# Altium schematic symbol library MIC5365-1P2YMT-TZ.SchLib: 1 symbol
Pins are listed as number, name and electrical type; pins without a type are passive.

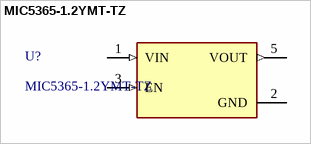
[diagram p0: symbol MIC5365-1.2YMT-TZ]

## MIC5365-1.2YMT-TZ
designator U?
No Description Available; Manufacturer_Name: Microchip; Copyright: Copyright (C) 2026 Ultra Librarian. All rights reserved.; Manufacturer_Part_Number: MIC5365-1.2YMT-TZ; RefDes: RefDes; Type: Type
footprint TMLF-4_MCH
pins: 1 VIN (in), 2 GND (power), 3 EN (in), 5 VOUT (out)